# Altium footprint library PcbLib.PcbLib: 162 footprints (part 2 of 11)
Each footprint in its own frame and in the unit in brackets; x right, y up, seen from the top. Pads: shape width x height; smd on the part's side, far side on the other; paste and mask are expansions set on the pad; w line width, h text height; cw(c..) or ccw(c..) is an arc to the next point about the centre after c.
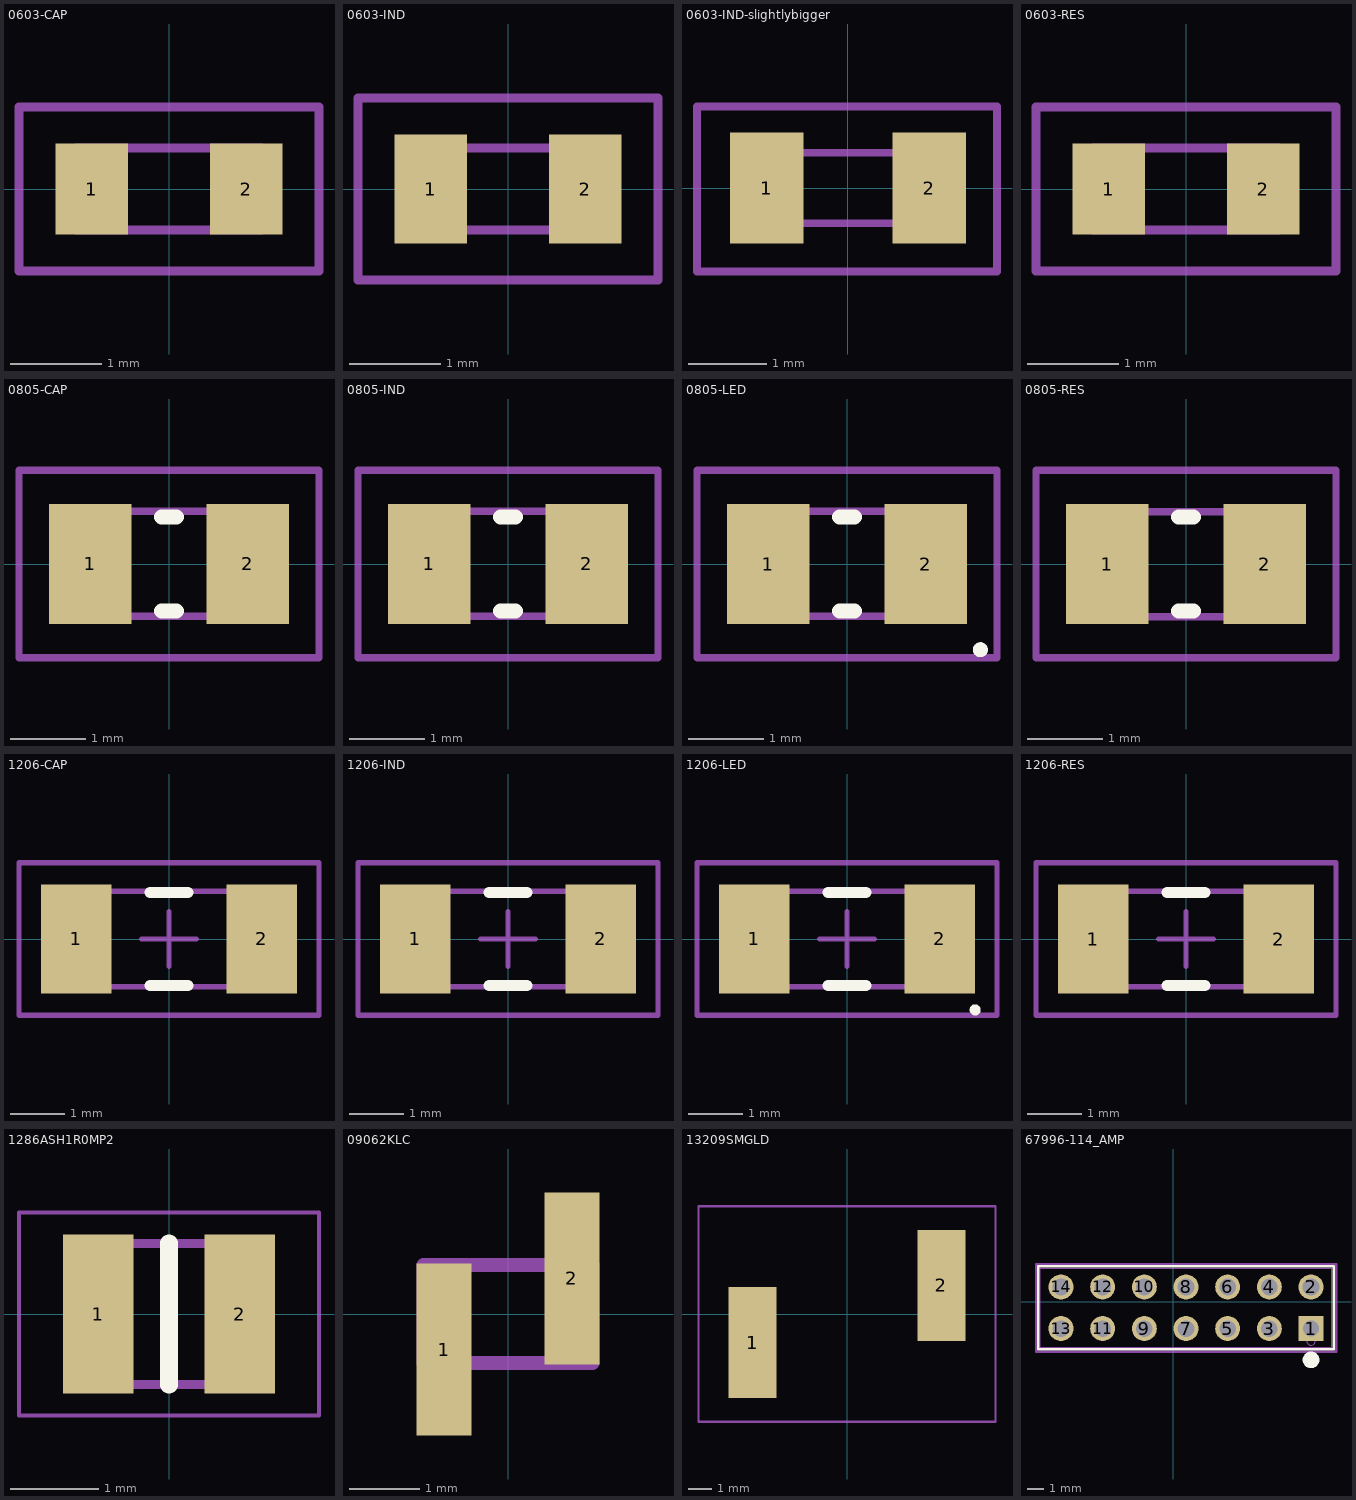
[diagram p1: the footprints below, top view; thin cyan lines are the x and y axes]

## 0603-CAP [mm] "Chip Capacitor, 2-Leads, Body 1.60x0.80mm, IPC Low Density"
height 0.9
pads (2):
  rect 0.8x1 smd: 1(-0.85,0) 2(0.85,0)
Mechanical 13:
  lines w0.1: -1.016,-0.45 1.016,-0.45 1.016,0.45 -1.016,0.45 -1.016,-0.45
Mechanical 29:
  lines w0.1: -1.65,-0.9 -1.65,0.9 1.65,0.9 1.65,-0.9 -1.65,-0.9
3D body "SW3dPS-0603 SMD Capacitor.STEP": height 0.3, standoff 0, extent -0.8,-0.4 0.8,0.4

## 0603-IND [mm] "Chip Inductor, 2-Leads, Body 1.60x0.80mm, IPC Low Density"
height 0.6
pads (2):
  rect 0.8x1.2 smd: 1(-0.85,0) 2(0.85,0)
Mechanical 13:
  lines w0.1: -1.016,-0.45 1.016,-0.45 1.016,0.45 -1.016,0.45 -1.016,-0.45
Mechanical 29:
  lines w0.1: -1.65,-1 -1.65,1 1.65,1 1.65,-1 -1.65,-1
3D body "User Library-Chip InductorINDC1608X95N.STEP": height 0.78, standoff -0.02, extent -0.804,-0.466 0.796,0.484

## 0603-IND-slightlybigger [mil] "Chip Inductor, 2-Leads, Body 1.60x0.80mm, IPC Low Density"
height 23.62
pads (2):
  rect 37x56 smd: 1(-41,0) 2(41,0)
Mechanical 13:
  lines w3.94: -40,-17.71 -40,17.72 40,17.72 40,-17.71 -40,-17.71
Mechanical 29:
  lines w3.94: -76,-42 75,-42 75,41 -76,41 -76,-42
3D body "User Library-ind_0805.STEP": height 37.4, standoff 0, extent -39.37,-23.62 39.37,23.62

## 0603-RES [mm] "Chip Resistor, 2-Leads, Body 1.60x0.80mm, IPC Low Density"
height 0.6
pads (2):
  rect 0.8x1 smd: 1(-0.85,0) 2(0.85,0)
Mechanical 13:
  lines w0.1: -1.016,-0.45 1.016,-0.45 1.016,0.45 -1.016,0.45 -1.016,-0.45
Mechanical 29:
  lines w0.1: -1.65,-0.9 -1.65,0.9 1.65,0.9 1.65,-0.9 -1.65,-0.9
3D body "SW3dPS-0603 SMD Resistor.STEP": height 0.3, standoff 0, extent -0.8,-0.4 0.8,0.4

## 0805-CAP [mm] "Chip Capacitor, 2-Leads, Body 2.00x1.25mm, IPC Low Density"
height 1.3
pads (2):
  rect 1.1x1.6 smd: 1(-1.05,0) 2(1.05,0)
Top Overlay:
  lines w0.2: -0.1,-0.625 0.1,-0.625 ; -0.1,0.625 0.1,0.625
Mechanical 13:
  lines w0.1: -1.27,-0.7 1.27,-0.7 1.27,0.7 -1.27,0.7 -1.27,-0.7
Mechanical 29:
  lines w0.1: -2,-1.25 -2,1.25 2,1.25 2,-1.25 -2,-1.25
3D body "SW3dPS-0805 SMD Capacitor.STEP": height 0.78, standoff 0, extent -1,-0.625 1,0.625

## 0805-IND [mm] "Chip Inductor, 2-Leads, Body 2.00x1.25mm, IPC Low Density"
height 0.8
pads (2):
  rect 1.1x1.6 smd: 1(-1.05,0) 2(1.05,0)
Top Overlay:
  lines w0.2: -0.1,-0.625 0.1,-0.625 ; -0.1,0.625 0.1,0.625
Mechanical 13:
  lines w0.1: -1.27,-0.7 -1.27,0.7 1.27,0.7 1.27,-0.7 -1.27,-0.7
Mechanical 29:
  lines w0.1: -2,-1.25 2,-1.25 2,1.25 -2,1.25 -2,-1.25
3D body "User Library-ind_0805.STEP": height 0.95, standoff 0, extent -1,-0.6 1,0.6

## 0805-LED [mm] "Chip LED, 2-Leads, Body 2.00x1.25mm, IPC Low Density"
height 1
pads (2):
  rect 1.1x1.6 smd: 1(-1.05,0) 2(1.05,0)
Top Overlay:
  circle w0.1: c1.778,-1.143 r0.05
  lines w0.2: -0.1,-0.625 0.1,-0.625 ; -0.1,0.625 0.1,0.625
Mechanical 13:
  lines w0.1: -1.27,-0.7 1.27,-0.7 1.27,0.7 -1.27,0.7 -1.27,-0.7
Mechanical 29:
  lines w0.1: -2,-1.25 -2,1.25 2,1.25 2,-1.25 -2,-1.25
3D body "User Library-led_0805.STEP": height 1.1, standoff 0, extent -1.01,-0.625 1.01,0.625

## 0805-RES [mm] "Chip Resistor, 2-Leads, Body 2.00x1.25mm, IPC Low Density"
height 1
pads (2):
  rect 1.1x1.6 smd: 1(-1.05,0) 2(1.05,0)
Top Overlay:
  lines w0.2: -0.1,-0.625 0.1,-0.625 ; -0.1,0.625 0.1,0.625
Mechanical 13:
  lines w0.1: -1.27,-0.7 1.27,-0.7 1.27,0.7 -1.27,0.7 -1.27,-0.7
Mechanical 29:
  lines w0.1: -2,-1.25 2,-1.25 2,1.25 -2,1.25 -2,-1.25
3D body "SW3dPS-0805 SMD Resistor.STEP": height 0.78, standoff 0, extent -1,-0.625 1,0.625

## 1206-CAP [mm] "Chip Capacitor, 2-Leads, Body 3.20x1.60mm, IPC Low Density"
height 1.8
pads (2):
  rect 1.3x2 smd: 1(-1.7,0) 2(1.7,0)
Top Overlay:
  lines w0.2: -0.35,-0.85 0.35,-0.85 ; -0.35,0.85 0.35,0.85
Mechanical 13:
  lines w0.1: -1.725,-0.875 1.725,-0.875 1.725,0.875 -1.725,0.875 -1.725,-0.875
Mechanical 15:
  lines w0.05: -2.75,-1.4 2.75,-1.4 2.75,1.4 -2.75,1.4 -2.75,-1.4
  lines w0.1: -0.5,0 0.5,0 ; 0,-0.5 0,0.5
Mechanical 29:
  lines w0.1: -2.75,-1.4 -2.75,1.4 2.75,1.4 2.75,-1.4 -2.75,-1.4
3D body "SW3dPS-1206 SMD Capacitor.STEP": height 1, standoff 0, extent -1.6,-0.8 1.6,0.8

## 1206-IND [mm] "Chip Inductor, 2-Leads, Body 3.20x1.60mm, IPC Low Density"
height 1
pads (2):
  rect 1.3x2 smd: 1(-1.7,0) 2(1.7,0)
Top Overlay:
  lines w0.2: -0.35,-0.85 0.35,-0.85 ; -0.35,0.85 0.35,0.85
Mechanical 13:
  lines w0.1: -1.725,-0.875 -1.725,0.875 1.725,0.875 1.725,-0.875 -1.725,-0.875
Mechanical 15:
  lines w0.05: -2.75,-1.4 -2.75,1.4 2.75,1.4 2.75,-1.4 -2.75,-1.4
  lines w0.1: -0.5,0 0.5,0 ; 0,-0.5 0,0.5
Mechanical 29:
  lines w0.1: -2.75,-1.4 2.75,-1.4 2.75,1.4 -2.75,1.4 -2.75,-1.4
3D body "User Library-ind_1206.STEP": height 1.1, standoff 0, extent -1.6,-0.8 1.6,0.8

## 1206-LED [mm] "Chip LED, 2-Leads, Body 3.10x1.50mm, IPC Low Density"
height 1.3
pads (2):
  rect 1.3x2 smd: 1(-1.7,0) 2(1.7,0)
Top Overlay:
  circle w0.1: c2.35,-1.3 r0.05
  lines w0.2: -0.35,-0.85 0.35,-0.85 ; -0.35,0.85 0.35,0.85
Mechanical 13:
  lines w0.1: -1.725,-0.875 -1.725,0.875 1.725,0.875 1.725,-0.875 -1.725,-0.875
Mechanical 15:
  lines w0.05: -2.75,-1.4 -2.75,1.4 2.75,1.4 2.75,-1.4 -2.75,-1.4
  lines w0.1: -0.5,0 0.5,0 ; 0,-0.5 0,0.5
Mechanical 29:
  lines w0.1: -2.75,-1.4 -2.75,1.4 2.75,1.4 2.75,-1.4 -2.75,-1.4
3D body "User Library-led_1206LED1206 blue.STEP": height 1.1, standoff 0, extent -1.61,-0.8 1.61,0.8

## 1206-RES [mm] "Chip Resistor, 2-Leads, Body 3.20x1.60mm, IPC Low Density"
height 1.3
pads (2):
  rect 1.3x2 smd: 1(-1.7,0) 2(1.7,0)
Top Overlay:
  lines w0.2: -0.35,-0.85 0.35,-0.85 ; -0.35,0.85 0.35,0.85
Mechanical 13:
  lines w0.1: -1.725,-0.875 1.725,-0.875 1.725,0.875 -1.725,0.875 -1.725,-0.875
Mechanical 15:
  lines w0.05: -2.75,-1.4 2.75,-1.4 2.75,1.4 -2.75,1.4 -2.75,-1.4
  lines w0.1: -0.5,0 0.5,0 ; 0,-0.5 0,0.5
Mechanical 29:
  lines w0.1: -2.75,-1.4 2.75,-1.4 2.75,1.4 -2.75,1.4 -2.75,-1.4
3D body "SW3dPS-1206 SMD Resistor.STEP": height 1, standoff 0, extent -1.6,-0.8 1.6,0.8

## 1286ASH1R0MP2 [mm]
pads (2):
  rect 0.8x1.8 smd: 1(-0.8,0) 2(0.8,0)
Top Overlay:
  lines w0.2: 0,-0.8 0,0.8
Mechanical 13:
  lines w0.1: -1,-0.8 1,-0.8 1,0.8 -1,0.8 -1,-0.8
Mechanical 15:
  lines w0.05: -1.7,-1.15 1.7,-1.15 1.7,1.15 -1.7,1.15 -1.7,-1.15
3D body "DFE201612E-2R2M=P2.stp": height 1.2, standoff 0, extent -1,-0.8 1,0.8

## 09062KLC [mm]
pads (2):
  rect 0.79x2.46 smd: 1(-0.915,-0.51) 2(0.915,0.51)
Mechanical 13:
  lines w0.2: -1.205,-0.7 -1.205,0.7 1.205,0.7 1.205,-0.7 -1.205,-0.7
3D body "Coilcraft-0906-2L.STEP": height 1.31, standoff -0.01, extent -1.135,-1.587 1.161,1.587

## 13209SMGLD [mm]
pads (2):
  rect 2.04x4.7 smd: 1(-3.99,-1.205) 2(3.99,1.205)
Mechanical 20:
  lines w0.1: -6.275,-4.555 6.275,-4.555 6.275,4.555 -6.275,4.555 -6.275,-4.555
3D body "Coilcraft-132-09SML.STEP": height 5.25, standoff -0.48, extent -7.798,5.817 2.362,12.421
3D body "Coilcraft-2712SP-XXX.STEP": height 2.8, standoff -0.1, extent -3.226,-1.981 3.226,1.956

## 67996-114_AMP [mil]
pads (14):
  rect 60x60 hole 38 mask+0: 1(331,-65)
  round 60 hole 40 mask+0: 2(331,35) 3(231,-65) 4(231,35) 5(131,-65) 6(131,35) 7(31,-65) 8(31,35) 9(-69,-65) 10(-69,35) 11(-169,-65) 12(-169,35) 13(-269,-65) 14(-269,35)
Top Overlay:
  circle w20: c331,-140 r10
  lines w6: -324,-115 386,-115 386,85 -324,85 -324,-115
Mechanical 13:
  circle w0: c331,-95 r10
  lines w1: -319,-110 381,-110 381,80 -319,80 -319,-110
Mechanical 15:
  lines w6: -329,-120 -329,90 391,90 391,-120 -329,-120
3D body "67996-114_AMP.step": height 350, standoff -200, extent -319,-115 381,85